# EAGLE library part TPL5010 (library madhu)
Texas Instruments Nano-Power System Timer With Watchdog Function datasheet <https://www.ti.com/lit/ds/symlink/tpl5010.pdf>
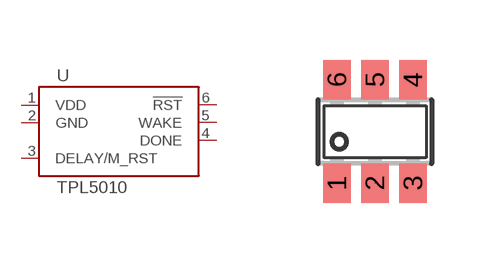
[diagram p31: symbol with the pads of SOT23-6; footprint SOT23-6]

Designator prefix U

## TPL5010DDCR  [SOT23-6]
1  VDD  pwr
2  GND  pwr
3  DELAY/M_RST  in
4  DONE  out
5  WAKE  out
6  !RST!  oc

## Footprint SOT23-6 (pad centres in mm)
Small Outline Transistor SOT753 - Philips Semiconductors Source: http://www.semiconductors.philips.com/acrobat_download/datasheets/74HC_HCT1G66_3.pdf
smd 0.69 x 0.99: 1 -0.95,-1.29; 2 0,-1.29; 3 0.95,-1.29; 4 0.95,1.3; 5 0,1.3; 6 -0.95,1.3